# Altium schematic symbol library Voltage_regulators.SchLib: 4 symbols
Pins are listed as number, name and electrical type; pins without a type are passive.

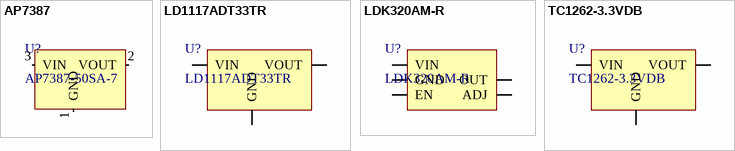
[diagram p0: symbols AP7387 to TC1262-3.3VDB]

## AP7387
designator U?, comment AP7387-50SA-7
WIDE INPUT VOLTAGE RANGE, 150mA ULDO REGULATOR; Manufacturer: Diodes Incorporated; Vout: 5V; Iout: 150mA
footprint SOT90P240X110-3N (SOT23, 3-Leads, Body 2,90x2,40mm, Pitch 0,90mm, IPC Medium Density)
pins: 1 GND (power), 2 VOUT (power), 3 VIN (power)

## LD1117ADT33TR
designator U?
IC: voltage regulator; LDO,linear,fixed; 3.3V; 1A; DPAK; SMD; ±4%
footprint LD1117ADT33TR (IC: voltage regulator; LDO,linear,fixed; 3.3V; 1A; DPAK; SMD; ±4%)
pins: 1 GND (power), 2 VOUT (power), 3 VIN (power)

## LDK320AM-R
designator U?
IC: voltage regulator; LDO,linear,adjustable; 1.2÷12V; 0.2A; SMD
footprint LDK320AM- (IC: voltage regulator; LDO,linear,adjustable; 1.2÷12V; 0.2A; SMD)
pins: 1 VIN (power), 2 GND (power), 3 EN, 4 ADJ, 5 OUT (power)

## TC1262-3.3VDB
designator U?
LDO Voltage Regulators 500mA Fixed Output CMOS
footprint TC1262-3.3VDB; pin to pad 2>2+4
pins: 1 VIN (power), 2 GND (power), 3 VOUT (power)